# EAGLE library part UJ20-C-V-G-SMT-P16-TR (library UJ20-C-V-G-SMT-P16-TR)
Type C, USB 2.0, 480 Mbps, 30 Vdc, 5 A, Vertical, Surface Mount Anchor Pins Mounting Style, Surface Mount Contact Pin Type, Gold plated 3 in, Through Hole, 14 pin, USB Receptacle Source: Datasheet <https://www.sameskydevices.com/product/resource/uj20-c-v-g-smt-p16-tr.pdf>
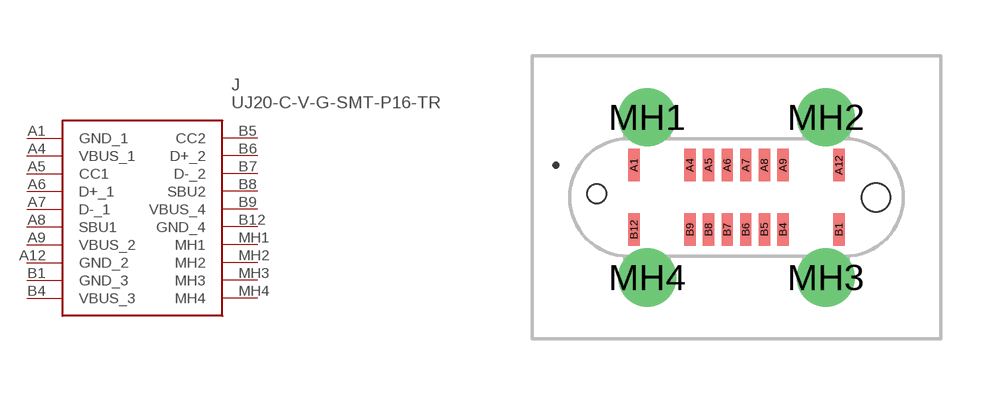
[diagram p0: symbol with the pads of UJ20CVGSMTP16TR; footprint UJ20CVGSMTP16TR]

Designator prefix J

## UJ20-C-V-G-SMT-P16-TR (Description: Type C, USB 2.0, 480 Mbps, 30 Vdc, 5 A, Vertical, Surface Mount Anchor Pins Mounting Style, Surface Mount Contact Pin Type, Gold plated 3 in, Through Hole, 14 pin, USB Receptacle; Height: 6.6mm; Manufacturer_Name: Same Sky; Manufacturer_Part_Number: UJ20-C-V-G-SMT-P16-TR; Mouser_Part_Number: 179-UJ20CVGSMTP16TR; Mouser_Price-Stock: https://www.mouser.co.uk/ProductDetail/Same-Sky/UJ20-C-V-G-SMT-P16-TR?qs=IKkN%2F947nfCQ0EYlGKCaDg%3D%3D)  [UJ20CVGSMTP16TR]
A1  GND_1
A4  VBUS_1
A5  CC1
A6  D+_1
A7  D-_1
A8  SBU1
A9  VBUS_2
A12  GND_2
B1  GND_3
B4  VBUS_3
B5  CC2
B6  D+_2
B7  D-_2
B8  SBU2
B9  VBUS_4
B12  GND_4
MH1  MH1
MH2  MH2
MH3  MH3
MH4  MH4

## Footprint UJ20CVGSMTP16TR (pad centres in mm)
UJ20-C-V-G-SMT-P16-TR-2
smd 0.3 x 0.87: A1 -2.75,0.865; A4 -1.25,0.865; A5 -0.75,0.865; A6 -0.25,0.865; A7 0.25,0.865; A8 0.75,0.865; A9 1.25,0.865; A12 2.75,0.865; B1 2.75,-0.865; B4 1.25,-0.865; B5 0.75,-0.865; B6 0.25,-0.865; B7 -0.25,-0.865; B8 -0.75,-0.865; B9 -1.25,-0.865; B12 -2.75,-0.865
drill 1.04 pad 1.3: MH1 -2.4,2.15; MH2 2.4,2.15; MH3 2.4,-2.15; MH4 -2.4,-2.15
hole 0.77 at 3.75,0
hole 0.52 at -3.75,0.1